# Altium footprint library ThruHole-Seeed-Studio-XIAO-ESP32C3-footprint-eagle.PCBLIB: 2 footprints
Each footprint in its own frame and in the unit in brackets; x right, y up, seen from the top. Pads: shape width x height; smd on the part's side, far side on the other; paste and mask are expansions set on the pad; w line width, h text height; cw(c..) or ccw(c..) is an arc to the next point about the centre after c.
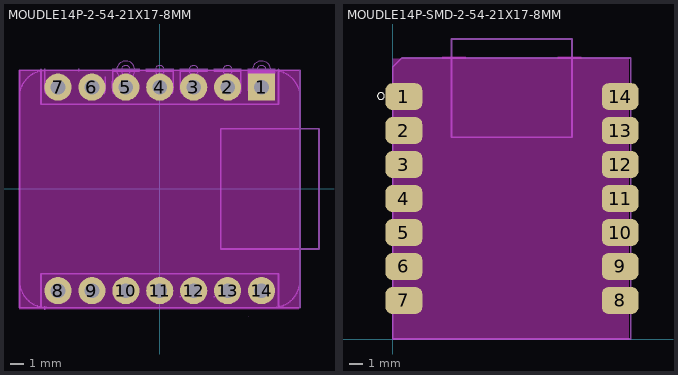
[diagram p0: the footprints below, top view; thin cyan lines are the x and y axes]

## MOUDLE14P-2-54-21X17-8MM [mil]
pads (14):
  rect 80x80 hole 43.31: 1(300,300)
  round 80 hole 43.31: 2(200,300) 3(100,300) 4(0,300) 5(-100,300) 6(-200,300) 7(-300,300) 8(-300,-300) 9(-200,-300) 10(-100,-300) 11(0,-300) 12(100,-300) 13(200,-300) 14(300,-300)
Top keep-out:
  region: -415,-355 -415,350 410,350 410,-355
tPlace:
  lines w5: -413.7,-350 413.1,-350 413.1,350 -413.7,350 -413.7,-350 ; 180,-177.2 469.4,-177.2 469.4,177.2 180,177.2 180,-177.2
tTest:
  lines w5: -350,-350 -350,-250 350,-250 350,-350 ; -350,350 -350,250 350,250 350,350
  text "JP2" at -360,-325 h54.25
  text "JP1" at -360,250 h54.25
Reference:
  drawing of 6613 lines, arcs and shapes, not listed

## MOUDLE14P-SMD-2-54-21X17-8MM [mm]
pads (14):
  rrect50% 2.75x2 smd: 1(0.835,18.12) 2(0.835,15.58) 3(0.835,13.04) 4(0.835,10.5) 5(0.835,7.96) 6(0.835,5.42) 7(0.835,2.88) 8(17,2.88) 9(17,5.42) 10(17,7.96) 11(17,10.5) 12(17,13.04) 13(17,15.58) 14(17,18.12)
Top keep-out:
  region: 6.35,0.635 6.35,3.175 12.065,3.175 12.065,0.635
  region: 3.683,18.415 3.683,21.082 5.461,21.082 5.461,18.415
  region: 3.683,14.351 3.683,17.018 5.461,17.018 5.461,14.351
  region: 12.319,14.351 12.319,17.018 14.097,17.018 14.097,14.351
  region: 12.319,18.415 12.319,21.082 14.097,21.082 14.097,18.415
  region: 0,0 0,20.955 17.653,20.955 17.653,0
  region: 5.461,10.287 3.429,10.287 3.429,13.208 5.461,13.208
  region: 12.827,8.255 9.779,8.255 9.779,11.303 12.827,11.303
  region: 6.35,13.335 6.35,20.32 11.557,20.32 11.557,13.335
Top Overlay:
  circle w0: c-0.889,18.161 r0.254
tPlace:
  lines w0.127: 4.396,22.425 4.396,15.072 13.395,15.072 13.395,22.424 4.4,22.424 ; 0,0 17.8,0 17.8,21 0.672,21 0,20.328 0,0